# Altium integrated library TLC082CP.IntLib: 2 symbols
Pins are listed as number, name and electrical type; pins without a type are passive.

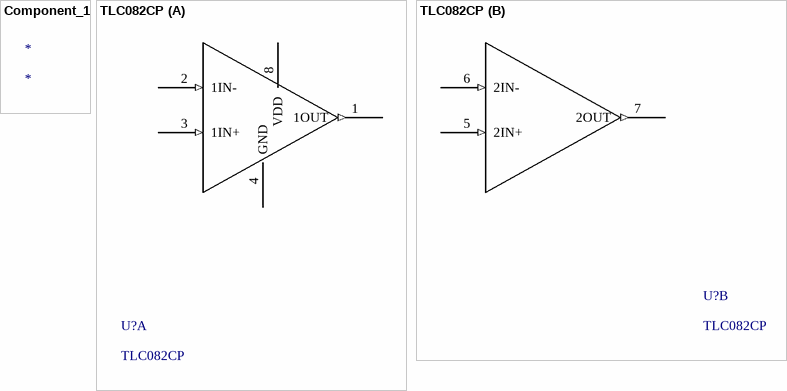
[diagram p0: symbols Component_1 to TLC082CP]

## Component_1
designator *

## TLC082CP
designator U?
Dual, 16-V, 10-MHz, In to V- op amp 8-PDIP 0 to 70; Manufacturer_Name: Texas Instruments; Copyright: Copyright (C) 2026 Ultra Librarian. All rights reserved.; Manufacturer_Part_Number: TLC082CP; Datasheet: https://www.ti.com/lit/gpn/tlc082; RefDes: RefDes; Type: Type
footprint P8
part A pins: 1 1OUT (out), 2 1IN- (in), 3 1IN+ (in), 4 GND (power), 8 VDD (power)
part B pins: 5 2IN+ (in), 6 2IN- (in), 7 2OUT (out)